# Altium schematic symbol library RC0603FR-072M2L.SchLib: 1 symbol
Pins are listed as number, name and electrical type; pins without a type are passive.

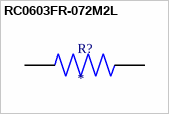
[diagram p0: symbol RC0603FR-072M2L]

## RC0603FR-072M2L
designator R?
Äiá»‡n trá»Ÿ mÃ ng dÃ y gáº¯n bá» máº·t, DÃ²ng RC, 2,2 Mohm, 100 mW, - 1%, 50 V, 0603 [1608 Metric]; MF: Yageo; MP: RC0603FR-072M2L; SnapEDA_Link: https://www.snapeda.com/parts/RC0603FR-072M2L/Yageo/view-part/?ref=snap; Package: 1608 Yageo; Value: *; Check_prices: https://www.snapeda.com/parts/RC0603FR-072M2L/Yageo/view-part/?ref=eda
footprint RESC1608X55N
pins: 1, 2